# Altium schematic symbol library EMBL51537_SC_SP2_V2.1_20210906_Library.SchLib: 34 symbols
Pins are listed as number, name and electrical type; pins without a type are passive.

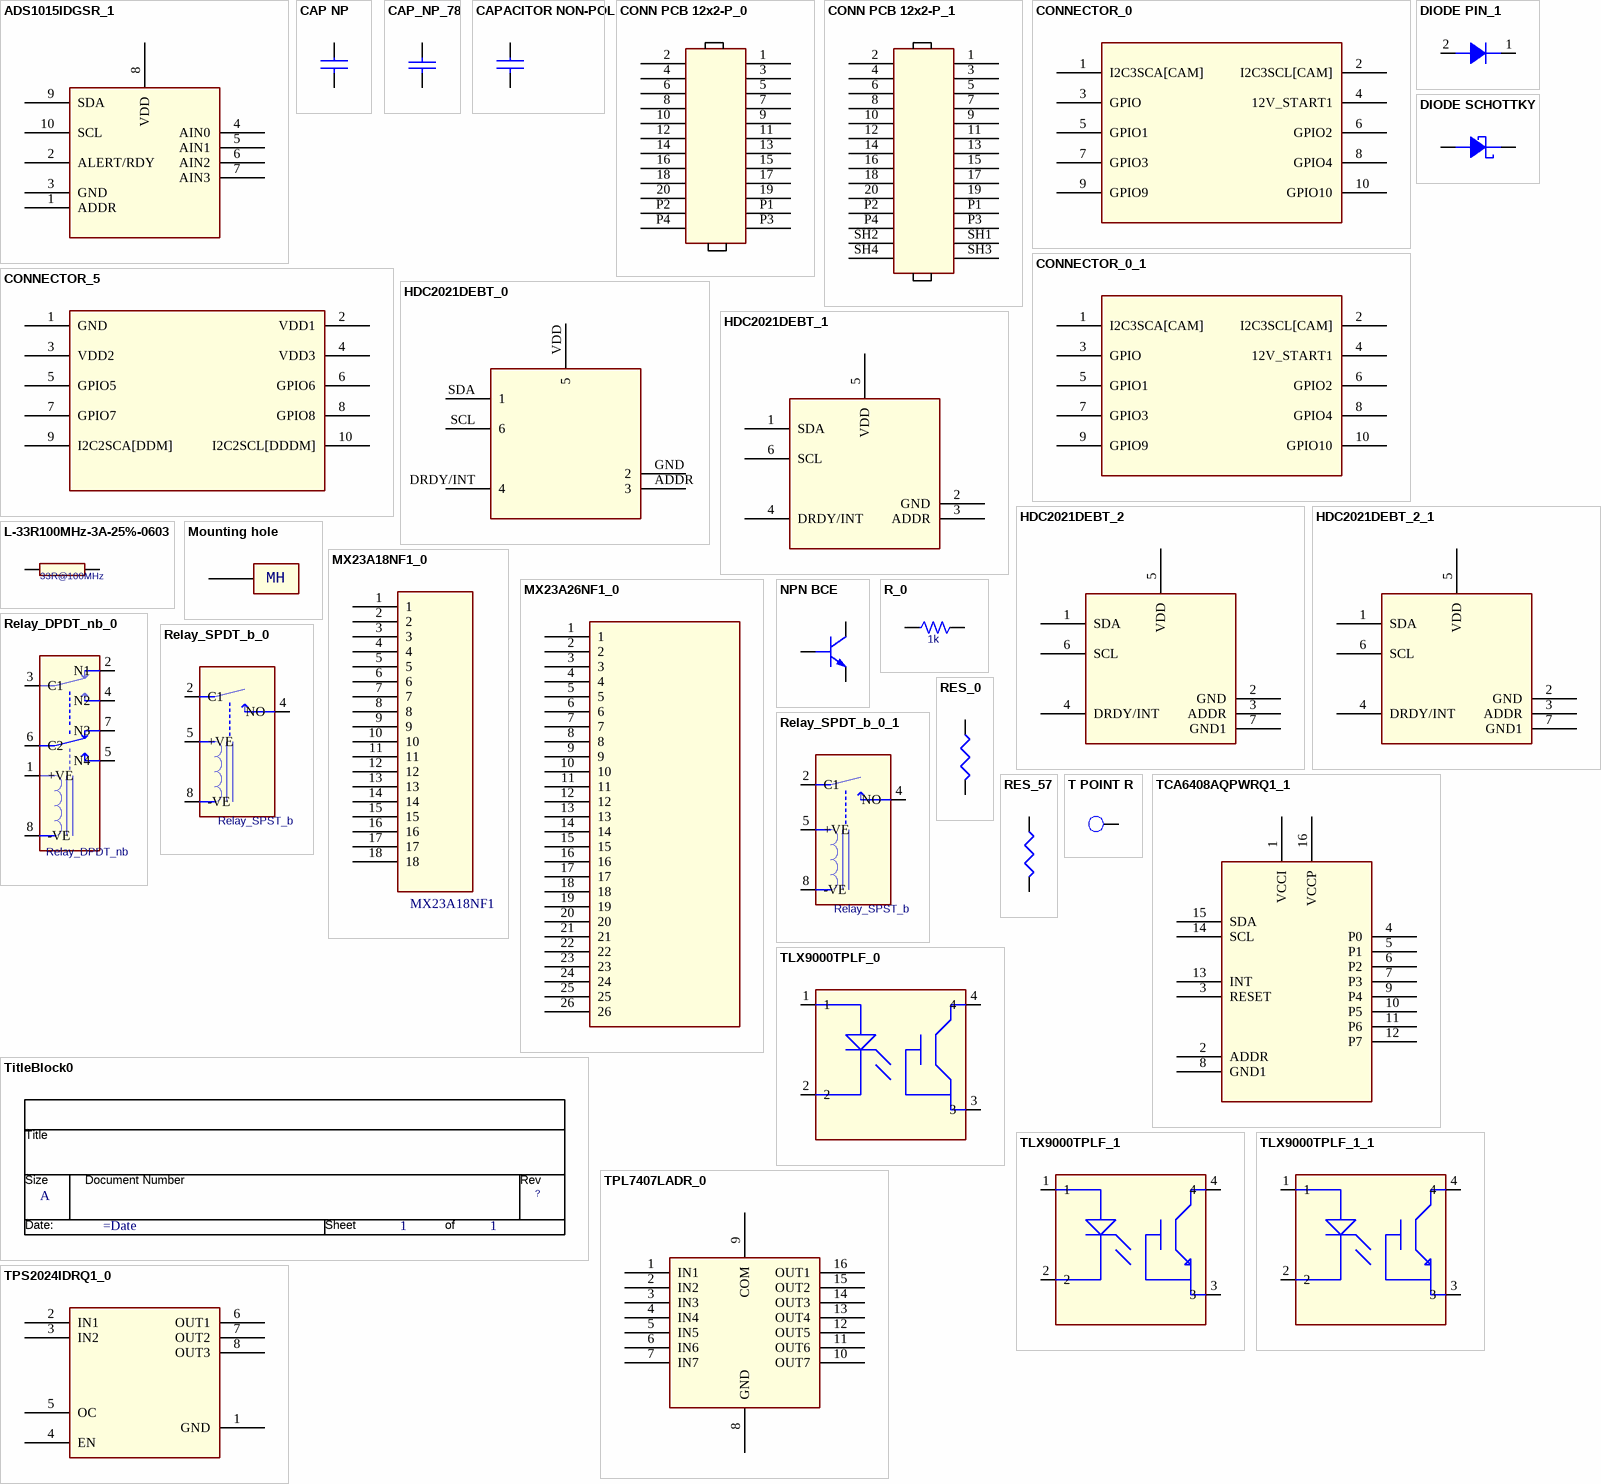
[diagram p0: symbols ADS1015IDGSR_1 to TPS2024IDRQ1_0]

## ADS1015IDGSR_1
designator U?
pins: 1 ADDR, 2 ALERT/RDY, 3 GND (power), 4 AIN0, 5 AIN1, 6 AIN2, 7 AIN3, 8 VDD (power), 9 SDA, 10 SCL

## CAP NP
designator C?
pins: 1, 2

## CAP_NP_78
designator C?
CLASS: DISCRETE
pins: 1, 2

## CAPACITOR NON-POL
designator C?
pins: 1, 2

## CONN PCB 12x2-P_0
designator J?
pins: 1 13, 2 1, 3 14, 4 2, 5 15, 6 3, 7 16, 8 4, 9 17, 10 5, 11 18, 12 6, 13 19, 14 7, 15 20, 16 8, 17 21, 18 9, 19 22, 20 10, P1, P2, P3, P4

## CONN PCB 12x2-P_1
designator J?
pins: 1 13, 2 1, 3 14, 4 2, 5 15, 6 3, 7 16, 8 4, 9 17, 10 5, 11 18, 12 6, 13 19, 14 7, 15 20, 16 8, 17 21, 18 9, 19 22, 20 10, P1, P2, P3, P4, SH1, SH2, SH3, SH4

## CONNECTOR_0
designator J?
pins: 1 I2C3SCA[CAM], 2 I2C3SCL[CAM], 3 GPIO, 4 12V_START1, 5 GPIO1, 6 GPIO2, 7 GPIO3, 8 GPIO4, 9 GPIO9, 10 GPIO10

## CONNECTOR_0_1
designator J?
pins: 1 I2C3SCA[CAM], 2 I2C3SCL[CAM], 3 GPIO, 4 12V_START1, 5 GPIO1, 6 GPIO2, 7 GPIO3, 8 GPIO4, 9 GPIO9, 10 GPIO10

## CONNECTOR_5
designator J?
pins: 1 GND (power), 2 VDD1 (power), 3 VDD2 (power), 4 VDD3 (power), 5 GPIO5, 6 GPIO6, 7 GPIO7, 8 GPIO8, 9 I2C2SCA[DDM], 10 I2C2SCL[DDDM]

## DIODE PIN_1
designator D?
pins: 1 K, 2 A

## DIODE SCHOTTKY
designator D?
pins: 1 ANODE, 2 CATHODE

## HDC2021DEBT_0
designator U?
pins: ADDR 3, DRDY/INT 4, GND 2 (power), SCL 6, SDA 1, VDD 5 (power)

## HDC2021DEBT_1
designator U?
pins: 1 SDA, 2 GND (power), 3 ADDR, 4 DRDY/INT, 5 VDD (power), 6 SCL

## HDC2021DEBT_2
designator U?
pins: 1 SDA, 2 GND (power), 3 ADDR, 4 DRDY/INT, 5 VDD (power), 6 SCL, 7 GND1 (power)

## HDC2021DEBT_2_1
designator U?
pins: 1 SDA, 2 GND (power), 3 ADDR, 4 DRDY/INT, 5 VDD (power), 6 SCL, 7 GND1 (power)

## L-33R100MHz-3A-25%-0603
designator L?, comment 33R@100MHz
Tolerance: 25%; Rating: 3A; User_Value: 33R@100MHz
footprint INDC1608X95N
pins: 1, 2

## Mounting hole
designator MH?  (value not drawn)
pins: 1
text: MH

## MX23A18NF1_0
designator J?, comment MX23A18NF1
pins: 1, 2, 3, 4, 5, 6, 7, 8, 9, 10, 11, 12, 13, 14, 15, 16, 17, 18

## MX23A26NF1_0
designator U?
pins: 1, 2, 3, 4, 5, 6, 7, 8, 9, 10, 11, 12, 13, 14, 15, 16, 17, 18, 19, 20, 21, 22, 23, 24, 25, 26

## NPN BCE
designator Q?
PspiceTemplate: Q^@REFDES %C %B %E
simulation model NPN BCE
pins: 1 B, 2 C, 3 E

## R_0
designator R?, comment 1k
TC2: 0; POWER: RMAX; MAX_TEMP: RTMAX; SLOPE: RSMAX; VOLTAGE: RVMAX; PSpiceTemplate: R^@REFDES %1 %2 ?TOLERANCE|R^@REFDES| @VALUE TC=@TC1,@TC2 ?TOLERANCE|\n.model R^@REFDES RES R=1 DEV=@TOLERANCE%|; DIST: FLAT; TC1: 0; Value: 1k
footprint AX/RC05
simulation model R_0
pins: 1, 2

## Relay_DPDT_nb_0
designator U?, comment Relay_DPDT_nb
PSpiceOnly: TRUE; PSpiceTemplate: X^@REFDES %A %B %NO1 %NC1 %COM1 %NO2 %NC2 %COM2 @MODEL PARAMS:\n+ T_make=@T_MAKE\n+ T_break=@T_BREAK\n+ I_pull=@I_PULL\n+ I_drop=@I_DROP\n+ R_coil=@R_COIL\n+ L_coil=@L_COIL\n+ R_open=@R_OPEN\n+ R_close=@R_CLOSE\n+Contact_match=@CONTACT_MATCH; CONTACT_MATCH: 0.95; R_CLOSE: .05; R_OPEN: 100MEG; L_COIL: 5mH; R_COIL: 100; I_DROP: 25ma; I_PULL: 35ma; T_BREAK: 10m; T_MAKE: 20m
simulation model Relay_Dpdt_Bhv
pins: 1 +VE, 2 N1, 3 C1, 4 N2, 5 N4, 6 C2, 7 N3, 8 -VE

## Relay_SPDT_b_0
designator U?, comment Relay_SPST_b
T_BOUNCE: 5m; T_MAKE: 20m; T_BREAK: 10m; I_PULL: 35ma; I_DROP: 25ma; R_COIL: 100; L_COIL: 5mH; R_OPEN: 100MEG; R_CLOSE: .05; PSpiceTemplate: X^@REFDES %A %B %NO %NC %COM @MODEL PARAMS:\n+ T_make=@T_MAKE\n+ T_break=@T_BREAK\n+ T_bounce=@T_BOUNCE\n+ I_pull=@I_PULL\n+ I_drop=@I_DROP\n+ R_coil=@R_COIL\n+ L_coil=@L_COIL\n+ R_open=@R_OPEN\n+ R_close=@R_CLOSE; PSpiceOnly: TRUE
simulation model Relay_Spdt_Bhv_Bounce
pins: 2 C1, 4 NO, 5 +VE, 8 -VE

## Relay_SPDT_b_0_1
designator U?, comment Relay_SPST_b
T_BOUNCE: 5m; T_MAKE: 20m; T_BREAK: 10m; I_PULL: 35ma; I_DROP: 25ma; R_COIL: 100; L_COIL: 5mH; R_OPEN: 100MEG; R_CLOSE: .05; PSpiceTemplate: X^@REFDES %A %B %NO %NC %COM @MODEL PARAMS:\n+ T_make=@T_MAKE\n+ T_break=@T_BREAK\n+ T_bounce=@T_BOUNCE\n+ I_pull=@I_PULL\n+ I_drop=@I_DROP\n+ R_coil=@R_COIL\n+ L_coil=@L_COIL\n+ R_open=@R_OPEN\n+ R_close=@R_CLOSE; PSpiceOnly: TRUE
simulation model Relay_Spdt_Bhv_Bounce
pins: 2 C1, 4 NO, 5 +VE, 8 -VE

## RES_0
designator R?
CLASS: DISCRETE
pins: 1, 2

## RES_57
designator R?
CLASS: DISCRETE
pins: 1, 2

## T POINT R
designator TP?
pins: 1 TP

## TCA6408AQPWRQ1_1
designator U?
pins: 1 VCCI (power), 2 ADDR, 3 RESET, 4 P0, 5 P1, 6 P2, 7 P3, 8 GND1 (power), 9 P4, 10 P5, 11 P6, 12 P7, 13 INT, 14 SCL, 15 SDA, 16 VCCP (power)

## TitleBlock0
designator *  Page Count: 1  Page Size: A  (hidden comment: *)  (graphical)
Page Number: 1; RevCode: ?; Page Create Date: March  8, 1995; Page Modify Date: =Date
text: Title; Size; Document Number; Rev; Date:; Sheet; of

## TLX9000TPLF_0
designator Q?
pins: 1, 2, 3, 4

## TLX9000TPLF_1
designator Q?
pins: 1, 2, 3, 4

## TLX9000TPLF_1_1
designator Q?
pins: 1, 2, 3, 4

## TPL7407LADR_0
designator U?
pins: 1 IN1, 2 IN2, 3 IN3, 4 IN4, 5 IN5, 6 IN6, 7 IN7, 8 GND (power), 9 COM (power), 10 OUT7, 11 OUT6, 12 OUT5, 13 OUT4, 14 OUT3, 15 OUT2, 16 OUT1

## TPS2024IDRQ1_0
designator U?
pins: 1 GND (power), 2 IN1 (power), 3 IN2 (power), 4 EN, 5 OC, 6 OUT1, 7 OUT2, 8 OUT3